# Altium footprint library SamacSys.PcbLib: 1008 footprints (part 29 of 63)
Each footprint in its own frame and in the unit in brackets; x right, y up, seen from the top. Pads: shape width x height; smd on the part's side, far side on the other; paste and mask are expansions set on the pad; w line width, h text height; cw(c..) or ccw(c..) is an arc to the next point about the centre after c.
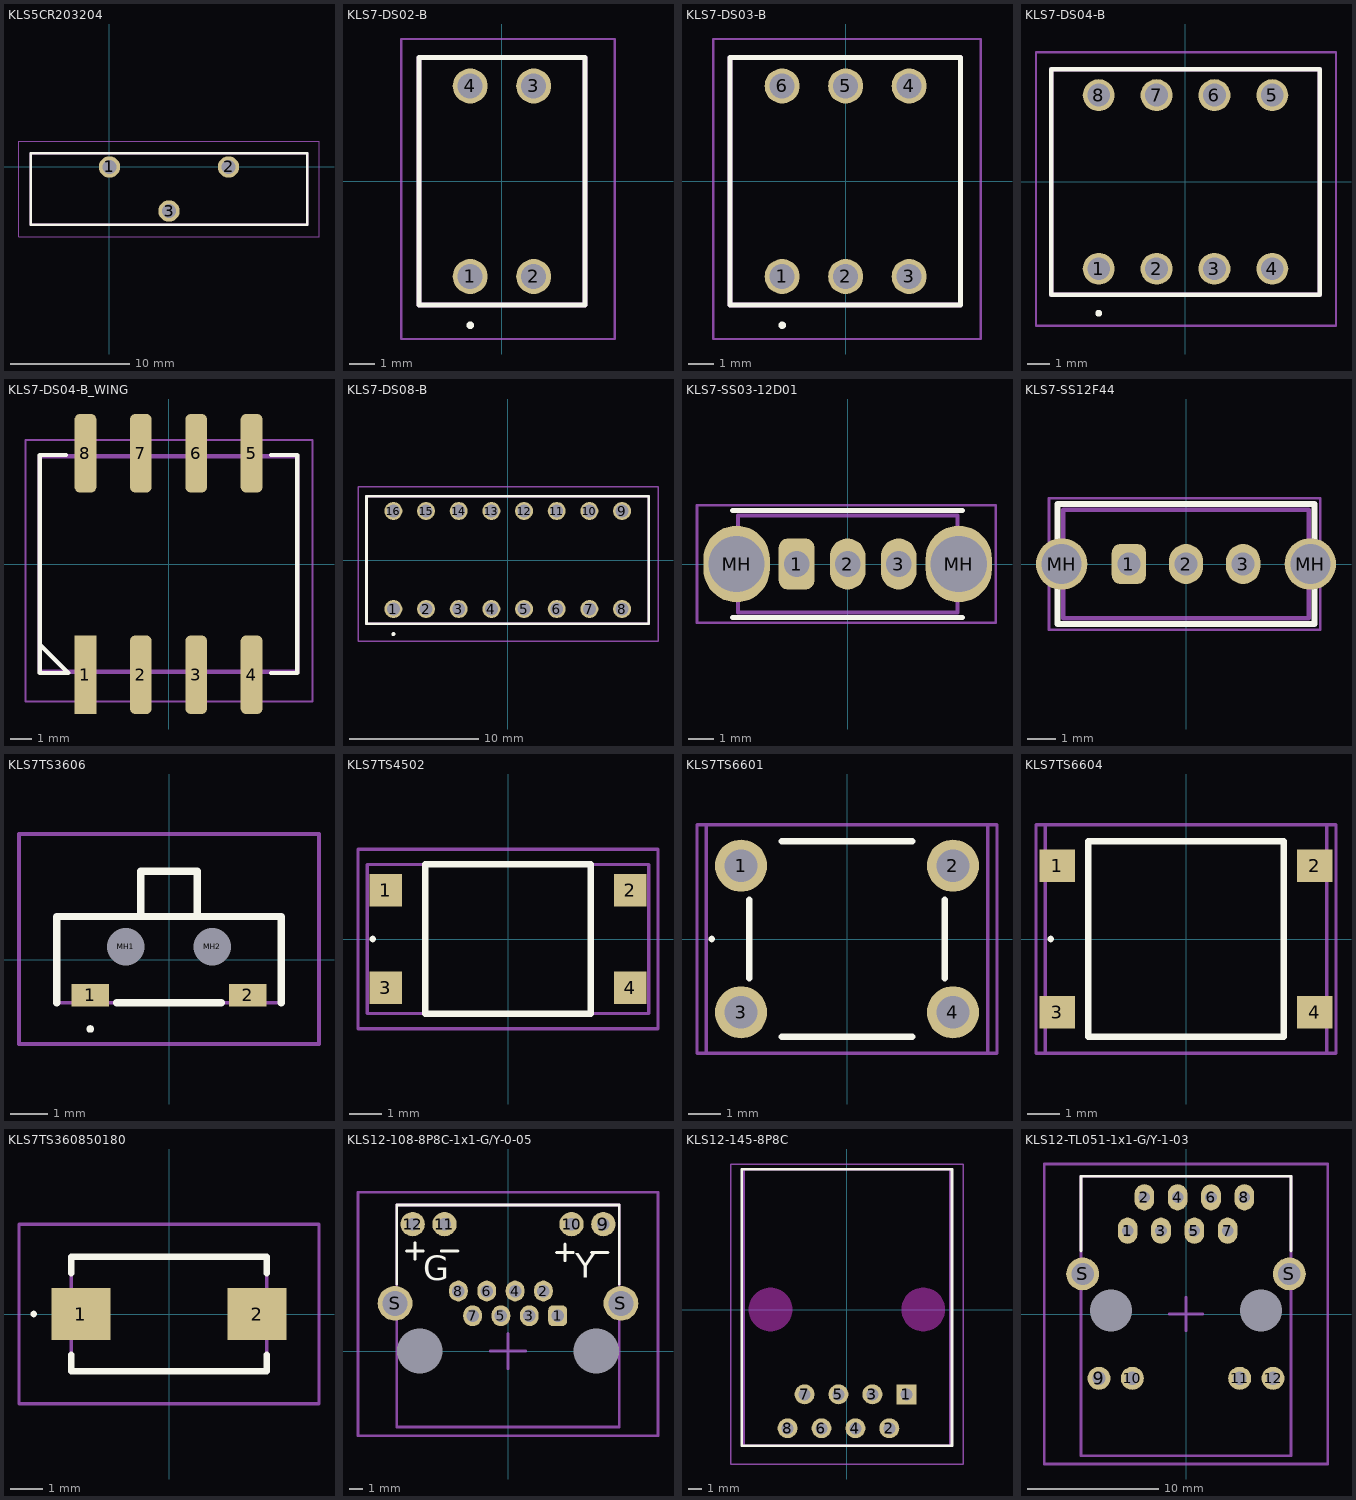
[diagram p28: the footprints below, top view; thin cyan lines are the x and y axes]

## KLS5CR203204 [mm]
pads (3):
  round 1.8 hole 1.2: 1(0,0) 2(10,0) 3(5,-3.7)
Top Overlay:
  lines w0.2: -6.6,-4.85 -6.6,1.15 16.6,1.15 16.6,-4.85 -6.6,-4.85
Assembly:
  lines w0.2: -6.6,-4.85 -6.6,1.15 16.6,1.15 16.6,-4.85 -6.6,-4.85
Countryard:
  lines w0.1: -7.6,-5.85 -7.6,2.15 17.6,2.15 17.6,-5.85 -7.6,-5.85
3D body "Battery Holder Top with CR2032.stp": height 25.11, standoff -3.5, extent -6.45,-4.9 16.45,1.987

## KLS7-DS02-B [mm]
height 6
pads (4):
  round 1.4 hole 1: 1(-1.27,-3.81) 2(1.27,-3.81) 3(1.27,3.81) 4(-1.27,3.81)
Top Overlay:
  lines w0.2: -1.27,-5.81 cw(c-1.27,-5.76) -1.27,-5.71 ; -1.27,-5.81 ccw(c-1.27,-5.76) -1.27,-5.71 ; -1.27,-5.81 cw(c-1.27,-5.76) -1.27,-5.71 ; -3.32,-4.95 3.32,-4.95 3.32,4.95 -3.32,4.95 -3.32,-4.95
Assembly:
  lines w0.2: -3.32,-4.95 3.32,-4.95 3.32,4.95 -3.32,4.95 -3.32,-4.95
Countryard:
  lines w0.1: -4.02,-6.31 4.5,-6.31 4.5,5.69 -4.02,5.69 -4.02,-6.31
3D body "KLS7-DSTR-02-B.STEP": height 6, standoff -3, extent -3.29,-4.8 3.35,4.8

## KLS7-DS03-B [mm]
height 6
pads (6):
  round 1.4 hole 1: 1(-2.54,-3.81) 2(0,-3.81) 3(2.54,-3.81) 4(2.54,3.81) 5(0,3.81) 6(-2.54,3.81)
Top Overlay:
  lines w0.2: -2.54,-5.81 cw(c-2.54,-5.76) -2.54,-5.71 ; -2.54,-5.81 ccw(c-2.54,-5.76) -2.54,-5.71 ; -2.54,-5.81 cw(c-2.54,-5.76) -2.54,-5.71 ; -4.63,-4.95 4.6,-4.95 4.6,4.95 -4.63,4.95 -4.63,-4.95
Assembly:
  lines w0.2: -4.63,-4.95 4.6,-4.95 4.6,4.95 -4.63,4.95 -4.63,-4.95
Countryard:
  lines w0.1: -5.29,-6.31 5.4,-6.31 5.4,5.69 -5.29,5.69 -5.29,-6.31
3D body "User Library-DS1040-03 (DIP_switch).step": height 6.8, standoff -3.85, extent -4.54,-4.95 4.54,4.95

## KLS7-DS04-B [mm]
height 6
pads (8):
  round 1.4 hole 1: 1(-3.81,-3.81) 2(-1.27,-3.81) 3(1.27,-3.81) 4(3.81,-3.81) 5(3.81,3.81) 6(1.27,3.81) 7(-1.27,3.81) 8(-3.81,3.81)
Top Overlay:
  lines w0.2: -3.81,-5.81 cw(c-3.81,-5.76) -3.81,-5.71 ; -3.81,-5.81 ccw(c-3.81,-5.76) -3.81,-5.71 ; -3.81,-5.81 cw(c-3.81,-5.76) -3.81,-5.71 ; -5.9,-4.95 -5.9,4.95 5.9,4.95 5.9,-4.95 -5.9,-4.95
Assembly:
  lines w0.2: -5.9,-4.95 -5.9,4.95 5.9,4.95 5.9,-4.95 -5.9,-4.95
Countryard:
  lines w0.1: -6.56,-6.31 -6.56,5.69 6.604,5.69 6.604,-6.31 -6.56,-6.31
3D body "KLS7-DSTR-04-B.STEP": height 6, standoff -3, extent -5.86,-4.8 5.86,4.8

## KLS7-DS04-B_WING [mm]
height 6
pads (8):
  rect 1x3.6 smd: 1(-3.81,-5.08)
  rrect50% 1x3.6 smd: 2(-1.27,-5.08) 3(1.27,-5.08) 4(3.81,-5.08) 5(3.81,5.08) 6(1.27,5.08) 7(-1.27,5.08) 8(-3.81,5.08)
Top Overlay:
  lines w0.2: -5.9,-3.7 -4.6,-5 -5.9,-5 -5.9,4.95 ; -5.9,5 -4.7,5 ; 4.7,-5 5.9,-5 ; 4.7,5 5.9,5 ; 5.9,-4.95 5.9,4.95
Assembly:
  lines w0.2: -5.9,-4.95 -5.9,4.95 5.9,4.95 5.9,-4.95 -5.9,-4.95
Countryard:
  lines w0.1: -6.56,-6.31 -6.56,5.69 6.604,5.69 6.604,-6.31 -6.56,-6.31
3D body "KLS7-DSTR-04-B.STEP": height 6, standoff -3, extent -5.86,-4.8 5.86,4.8

## KLS7-DS08-B [mm]
height 6
pads (16):
  round 1.4 hole 1: 1(-8.89,-3.81) 2(-6.35,-3.81) 3(-3.81,-3.81) 4(-1.27,-3.81) 5(1.27,-3.81) 6(3.81,-3.81) 7(6.35,-3.81) 8(8.89,-3.81) 9(8.89,3.81) 10(6.35,3.81) 11(3.81,3.81) 12(1.27,3.81) 13(-1.27,3.81) 14(-3.81,3.81) 15(-6.35,3.81) 16(-8.89,3.81)
Top Overlay:
  lines w0.2: -8.89,-5.81 cw(c-8.89,-5.76) -8.89,-5.71 ; -8.89,-5.81 ccw(c-8.89,-5.76) -8.89,-5.71 ; -8.89,-5.81 cw(c-8.89,-5.76) -8.89,-5.71 ; -10.98,-4.95 -10.98,4.95 10.98,4.95 10.98,-4.95 -10.98,-4.95
Assembly:
  lines w0.2: -10.98,-4.95 -10.98,4.95 10.98,4.95 10.98,-4.95 -10.98,-4.95
Countryard:
  lines w0.1: -11.64,-6.31 -11.64,5.69 11.684,5.69 11.684,-6.31 -11.64,-6.31
3D body "KLS7-DSTR-04-B.STEP": height 6, standoff -3, extent -0.797,-4.787 10.923,4.813
3D body "KLS7-DSTR-04-B.STEP": height 6, standoff -3, extent -10.94,-4.8 0.78,4.8

## KLS7-SS03-12D01 [mm]
height 14
pads (5):
  rrect50% 1.4x2 hole 1: 1(-2,0)
  oval 1.4x2 hole 1: 2(0,0) 3(2,0)
  oval 2.6x3 hole 2.2: MH(-4.35,0) MH(4.35,0)
Top Overlay:
  lines w0.2: -4.5,-2.1 4.5,-2.1 ; -4.5,2.1 4.5,2.1
Assembly:
  lines w0.15: -4.3,-1.9 4.3,-1.9 4.3,1.9 -4.3,1.9 -4.3,-1.9
Countryard:
  lines w0.1: -5.9,-2.3 5.8,-2.3 5.8,2.3 -5.9,2.3 -5.9,-2.3
3D body "KLS7-SS03-12D01.STEP": height 5.6, standoff -3.6, extent -4.25,-1.85 4.25,1.85

## KLS7-SS12F44 [mm]
height 14
pads (5):
  rrect50% 1.2x1.4 hole 0.8: 1(-2,0)
  oval 1.2x1.4 hole 0.8: 2(0,0) 3(2,0)
  round 1.8 hole 1.4: MH(-4.35,0) MH(4.35,0)
Top Overlay:
  lines w0.2: -4.5,-2.1 4.5,-2.1 4.5,2.1 -4.5,2.1 -4.5,-2.1
Assembly:
  lines w0.15: -4.3,-1.9 4.3,-1.9 4.3,1.9 -4.3,1.9 -4.3,-1.9
Countryard:
  lines w0.1: -4.8,-2.3 4.7,-2.3 4.7,2.3 -4.8,2.3 -4.8,-2.3
3D body "KLS7-SS03-12D01.STEP": height 5.6, standoff -3.6, extent -4.25,-1.85 4.25,1.85

## KLS7TS3606 [mm]
pads (4):
  rect 1x0.6 smd: 1(-2.1,-0.95) 2(2.1,-0.95)
  round 0.5 hole 1 unplated: MH1(-1.15,0.35) MH2(1.15,0.35)
Top Overlay:
  lines w0.1: -2.1,-1.9 ccw(c-2.1,-1.85) -2.1,-1.8 ccw(c-2.1,-1.85) -2.1,-1.9
  lines w0.2: -3,-1.15 -3,1.15 3,1.15 3,-1.15 ; -1.4,-1.15 1.4,-1.15 ; -0.75,1.15 -0.75,2.35 0.75,2.35 0.75,1.15
Assembly:
  lines w0.1: -0.75,1.15 -0.75,2.35 0.75,2.35 0.75,1.15 ; -3,-1.15 -3,1.15 3,1.15 3,-1.15 -3,-1.15
Countryard:
  lines w0.1: -4,-2.25 -4,3.35 4,3.35 4,-2.25 -4,-2.25
3D body "IT-1188E.STEP": height 3.5, standoff -0.7, extent -3.902,-1.15 3.898,2.45

## KLS7TS4502 [mm] "4,5mm tactile button"
pads (4):
  rect 1x1 smd: 1(-3.75,1.5) 2(3.75,1.5) 3(-3.75,-1.5) 4(3.75,-1.5)
Top Overlay:
  circle w0.1: c-4.15,0 r0.05
  lines w0.1: -4.2,0 cw(c-4.15,0) -4.1,0
  lines w0.2: -2.54,-1.27 -2.54,2.286 2.54,2.286 2.54,1.25 ; -2.54,-1.25 -2.54,-2.286 2.54,-2.286 2.54,1.27
Assembly:
  lines w0.1: -4.318,-2.286 -4.318,2.286 4.318,2.286 4.318,-2.286 -4.318,-2.286
Countryard:
  lines w0.1: -4.6,-2.75 -4.6,2.75 4.6,2.75 4.6,-2.75 -4.6,-2.75
3D body "Tact Switch 4.5mm SMT.step": height 4.2, standoff 0, extent -3.75,-2.25 3.75,2.25

## KLS7TS6601 [mm] "6x6 mm tactile button"
pads (4):
  round 1.6 hole 1 unplated: 1(-3.25,2.25) 2(3.25,2.25) 3(-3.25,-2.25) 4(3.25,-2.25)
Top Overlay:
  circle w0.1: c-4.15,0 r0.05
  lines w0.1: -4.2,0 cw(c-4.15,0) -4.1,0
  lines w0.2: -3,-1.2 -3,1.2 ; -2,-3 2,-3 ; -2,3 2,3 ; 3,-1.2 3,1.2
Assembly:
  lines w0.1: -4.318,-3.5 -4.318,3.5 4.318,3.5 4.318,-3.5 -4.318,-3.5
Countryard:
  lines w0.1: -4.6,-3.5 -4.6,3.5 4.6,3.5 4.6,-3.5 -4.6,-3.5
3D body "TS6-SMT_H-5.0.step": height 5, standoff 0, extent -4,-3 4,3
3D body "KLS7-TS6601-12-180.stp": height 12, standoff -3.5, extent -3.85,-3 3.85,3

## KLS7TS6604 [mm] "6 2mm tactile button"
pads (4):
  rect 1.1x1 smd: 1(-3.95,2.25) 2(3.95,2.25) 3(-3.95,-2.25) 4(3.95,-2.25)
Top Overlay:
  circle w0.1: c-4.15,0 r0.05
  lines w0.1: -4.2,0 cw(c-4.15,0) -4.1,0
  lines w0.2: -3,-3 -3,3 3,3 3,-3 -3,-3
Assembly:
  lines w0.1: -4.318,-3.5 4.318,-3.5 4.318,3.5 -4.318,3.5 -4.318,-3.5
Countryard:
  lines w0.1: -4.6,-3.5 4.6,-3.5 4.6,3.5 -4.6,3.5 -4.6,-3.5
3D body "TS6-SMT_H-5.0.step": height 5, standoff 0, extent -4,-3 4,3

## KLS7TS360850180 [mm]
pads (2):
  rect 1.8x1.6 smd: 1(-2.7,0) 2(2.7,0)
Top Overlay:
  lines w0.1: -4.2,0 cw(c-4.15,0) -4.1,0 cw(c-4.15,0) -4.2,0
  lines w0.2: -3,-1.25 -3,-1.75 3,-1.75 3,-1.25 ; -3,1.25 -3,1.75 3,1.75 3,1.25
Assembly:
  lines w0.1: -3,-1.75 -3,1.75 3,1.75 3,-1.75 -3,-1.75
Countryard:
  lines w0.1: -4.6,-2.75 -4.6,2.75 4.6,2.75 4.6,-2.75 -4.6,-2.75
3D body "KLS7-TS3608-5.0-180.stp": height 5.1, standoff 0, extent -3.44,-1.75 3.44,1.75

## KLS12-108-8P8C-1x1-G/Y-0-05 [mm] "RJ45 Receptacle 1 Shielded Right-Angle WithLED"
height 13.55
pads (16):
  rrect50% 1.35x1.5 hole 0.9: 1(3.57,2.54)
  oval 1.35x1.5 hole 0.9: 2(2.55,4.32) 3(1.53,2.54) 4(0.51,4.32) 5(-0.51,2.54) 6(-1.53,4.32) 7(-2.55,2.54) 8(-3.57,4.32)
  round 1.75 hole 0.9: 9(6.86,9.13) 10(4.57,9.13) 11(-4.57,9.13) 12(-6.86,9.13)
  round 0 hole 3.25 unplated: M(-6.35,0) M(6.35,0)
  round 2.5 hole 1.8: S(-8.13,3.43) S(8.13,3.43)
Top Overlay:
  lines w0.2: -8,4.8 -8,10.5 0,10.5 8,10.5 8,4.8 ; -7.3,7.2 -6.1,7.2 ; -6.7,6.6 -6.7,7.8 ; -4.8,7.2 -3.6,7.2 ; 3.5,7.1 4.7,7.1 ; 4.1,6.5 4.1,7.7 ; 6,7.1 7.2,7.1
  text "G" at -6.108,4.514 h3
  text "Y" at 4.823,4.714 h3
3D Body:
  lines w0.2: -8,-5.46 8,-5.46 8,10.5 -8,10.5 -8,-5.46
Top Assembly:
  lines w0.1: -8,10.5 8,10.5 ; -8,10.5 -8,-5.46 8,-5.46 8,10.5 ; -8,10.5 8,10.5
Countryard:
  lines w0.2: -1.27,0 1.27,0 ; 0,-1.27 0,1.27 ; -10.795,-6.1 10.795,-6.1 10.795,11.43 -10.795,11.43 -10.795,-6.1
3D body "c-2-406549-1-r1-3d.stp": height 14.3, standoff -4.42, extent -9.314,-6.11 9.314,10.6

## KLS12-145-8P8C [mm]
pads (8):
  rect 1.493x1.493 hole 0.9: 1(4.445,-6.35)
  round 1.493 hole 0.9: 2(3.175,-8.89) 3(1.905,-6.35) 4(0.635,-8.89) 5(-0.635,-6.35) 6(-1.905,-8.89) 7(-3.175,-6.35) 8(-4.445,-8.89)
Top Overlay:
  lines w0.2: -7.874,-10.2 7.874,-10.2 7.874,10.5 -7.874,10.5 -7.874,-10.2
Keep-Out Layer:
  board cut-out: -4.09,0 -4.09,0.16 -4.152,0.474 -4.275,0.77 -4.453,1.036 -4.679,1.262 -4.945,1.44 -5.241,1.563 -5.555,1.625 -5.715,1.625 -5.875,1.625 -6.189,1.563 -6.485,1.44 -6.751,1.262 -6.977,1.036 -7.155,0.77 -7.278,0.474 -7.34,0.16 -7.34,0 -7.34,-0.16 -7.278,-0.474 -7.155,-0.77 -6.977,-1.036 -6.751,-1.262 -6.485,-1.44 -6.189,-1.563 -5.875,-1.625 -5.715,-1.625 -5.555,-1.625 -5.241,-1.563 -4.945,-1.44 -4.679,-1.262 -4.453,-1.036 -4.275,-0.77 -4.152,-0.474 -4.09,-0.16
  board cut-out: 4.09,0 4.09,-0.16 4.152,-0.474 4.275,-0.77 4.453,-1.036 4.679,-1.262 4.945,-1.44 5.241,-1.563 5.555,-1.625 5.715,-1.625 5.875,-1.625 6.189,-1.563 6.485,-1.44 6.751,-1.262 6.977,-1.036 7.155,-0.77 7.278,-0.474 7.34,-0.16 7.34,0 7.34,0.16 7.278,0.474 7.155,0.77 6.977,1.036 6.751,1.262 6.485,1.44 6.189,1.563 5.875,1.625 5.715,1.625 5.555,1.625 5.241,1.563 4.945,1.44 4.679,1.262 4.453,1.036 4.275,0.77 4.152,0.474 4.09,0.16
Assembly:
  lines w0.2: -7.715,-10.2 -7.715,10.5 7.725,10.5 7.725,-10.2 -7.715,-10.2
Countryard:
  lines w0.1: -8.715,-11.565 8.725,-11.565 8.725,10.9 -8.715,10.9 -8.715,-11.565
3D body "5555164-1.stp": height 12.09, standoff -4.3, extent -7.658,-10.111 7.658,8.05

## KLS12-TL051-1x1-G/Y-1-03 [mm] "Magnetic Jack with transformer leds"
height 13.55
pads (16):
  oval 1.5x2 hole 0.9: 1(-4.445,6.35) 2(-3.175,8.89) 3(-1.905,6.35) 4(-0.635,8.89) 5(0.635,6.35) 6(1.905,8.89) 7(3.175,6.35) 8(4.445,8.89)
  round 1.75 hole 1.02: 9(-6.63,-4.9) 10(-4.09,-4.9) 11(4.09,-4.9) 12(6.63,-4.9)
  round 0 hole 3.2 unplated: M(-5.715,0.25) M(5.715,0.25)
  round 2.5 hole 1.7: S(-7.875,3.05) S(7.875,3.05)
Top Overlay:
  lines w0.2: -8,4.8 -8,10.5 0,10.5 8,10.5 8,4.8
3D Body:
  lines w0.2: -8,-10.8 -8,10.5 8,10.5 8,-10.8 -8,-10.8
Top Assembly:
  lines w0.1: -8,10.5 8,10.5 ; -8,10.5 -8,-10.75 8,-10.75 8,10.5 ; -8,10.5 8,10.5
Countryard:
  lines w0.2: -1.27,0 1.27,0 ; 0,-1.27 0,1.27 ; -10.795,-11.43 -10.795,11.43 10.795,11.43 10.795,-11.43 -10.795,-11.43
3D body "Abracon ARJC02-111008B.STEP": height 16.07, standoff -3.7, extent -10.336,-10.851 10.336,10.25